# Altium integrated library Altium_Button.IntLib: 81 symbols (part 3 of 3)
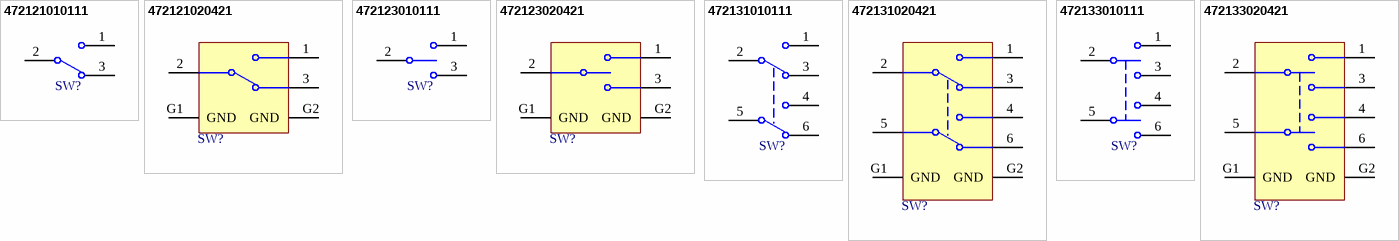
[diagram p6: symbols 472121010111 to 472133020421]

## 472133010111
designator SW?  (value not drawn)
WS-TOTV Ø 6.35mm Panel Cut-Out Vertical Operation Toggle Switch, DPDT, ON-OFF-ON, 30V, 1A; Manufacturer: Wurth Elektronik; Actuator Length: 10.7mm; Bushing Length: 9mm; Insulation Resistance: 1000MOhm; Withstanding Voltage: 500VAC; Manufacturer Part Number: 472133010111; Category: Toggle Switches; Match Code: WS-TOTV; Mount: Through Hole; Operating Temperature Max: 85°C; Operating Temperature Min: -40°C; Packaging: Tray; Length: 12.7mm; Width: 11.4mm; Height: 29.9mm; Circuit: DPDT; Rated Current: 1A; Rated Voltage (DC): 30V; Switching Function: ON-OFF-ON; Supplier 2 URL: https://www.mouser.com/ProductDetail/Wurth-Elektronik/472133010111?qs=ufv2HEpFn%252BTq2VwNlVuQRw%3D%3D; Supplier 2 URL: https://www.digikey.com/en/products/detail/w%C3%BCrth-elektronik/472133010111/18735350; Supplier 3 URL: N/A; LCSC Part #: N/A; ComponentLink1Description: Datasheet; ComponentLink1URL: https://www.we-online.com/redexpert/spec/472133010111?ad; Supplier 1: Mouser; Supplier 1 Part Number: 710-472133010111; Supplier 1 URL: N/A; Supplier 2: Digi-Key; Supplier 2 Part Number: 732-472133010111-ND; Supplier 3: thegioiic; Supplier 3 Part Number: OEM; Value: 472133010111
footprint 472133010111
pins: 1, 2, 3, 4, 5, 6

## 472133020421
designator SW?  (value not drawn)
WS-TOTV Ø 6.35 mm Panel Cut-Out Right Angle Operation Toggle Switch, DPDT, ON-OFF-ON, 30V, 1A; Manufacturer: Wurth Elektronik; Actuator Length: 7mm; Bushing Length: 7.1mm; Insulation Resistance: 1000MOhm; Withstanding Voltage: 500VAC; Manufacturer Part Number: 472133020421; Category: Toggle Switches; Match Code: WS-TOTV; Mount: Through Hole; Operating Temperature Max: 85°C; Operating Temperature Min: -40°C; Packaging: Tray; Length: 12.7mm; Width: 22.9mm; Height: 11.4mm; Circuit: DPDT; Rated Current: 1A; Rated Voltage (DC): 30V; Switching Function: ON-OFF-ON; Supplier 2 URL: https://www.mouser.com/ProductDetail/Wurth-Elektronik/472133020421?qs=ufv2HEpFn%252BS3IwFsDkXC6w%3D%3D; Supplier 2 URL: https://www.digikey.com/en/products/detail/w%C3%BCrth-elektronik/472133020421/18735388; Supplier 3 URL: N/A; LCSC Part #: N/A; ComponentLink1Description: Datasheet; ComponentLink1URL: https://www.we-online.com/redexpert/spec/472133020421?ad; Supplier 1: Mouser; Supplier 1 Part Number: 710-472133020421; Supplier 1 URL: N/A; Supplier 2: Digi-Key; Supplier 2 Part Number: 732-472133020421-ND; Supplier 3: thegioiic; Supplier 3 Part Number: OEM; Value: 472133020421
footprint 472133020421
pins: 1, 2, 3, 4, 5, 6, G1 GND, G2 GND